# Altium footprint library Switch$.PcbLib: 117 footprints (part 8 of 8)
Each footprint in its own frame and in the unit in brackets; x right, y up, seen from the top. Pads: shape width x height; smd on the part's side, far side on the other; paste and mask are expansions set on the pad; w line width, h text height; cw(c..) or ccw(c..) is an arc to the next point about the centre after c.
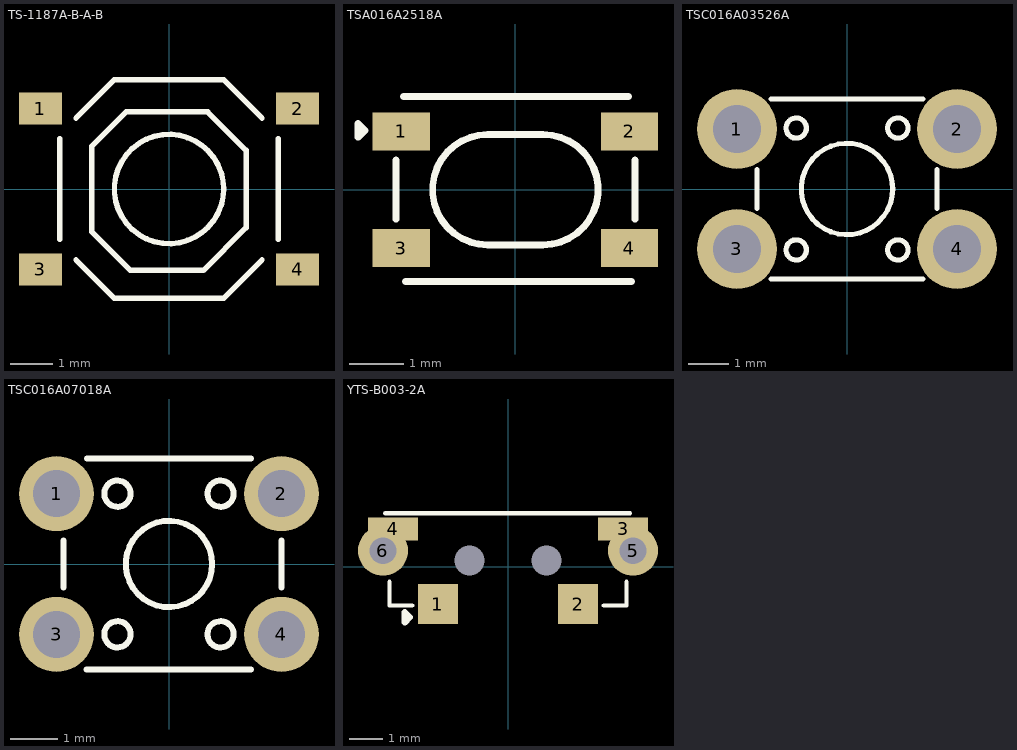
[diagram p7: the footprints below, top view; thin cyan lines are the x and y axes]

## TS-1187A-B-A-B [mm]
pads (4):
  rect 1x0.75 smd: 1(-3,1.875) 2(3,1.875) 3(-3,-1.875) 4(3,-1.875)
Top Overlay:
  circle w0.127: c0,0 r1.275
  lines w0.127: -2.55,-1.168 -2.55,1.168 ; -2.17,-1.655 -1.275,-2.55 1.275,-2.55 2.17,-1.655 ; -2.17,1.655 -1.275,2.55 1.275,2.55 2.17,1.655 ; 2.55,-1.168 2.55,1.168 ; -1.801,-0.998 -0.899,-1.9 0.8,-1.9 1.801,-0.899 1.801,0.899 0.899,1.801 -1.001,1.801 -1.801,1.001 -1.801,-0.998
3D body "C318884.step": height 1.55, standoff 0, extent -3.25,-2.601 3.25,2.601

## TSA016A2518A [mm]
pads (4):
  rect 1.05x0.7 smd paste+0 mask+0.051: 1(-2.1,1.075) 2(2.1,1.075) 3(-2.1,-1.075) 4(2.1,-1.075)
Top Overlay:
  lines w0.127: -2.2,-0.544 -2.2,0.544 ; -2.06,1.712 -1.366,1.712 1.366,1.712 2.08,1.712 ; -2.02,-1.686 -1.395,-1.686 1.367,-1.686 2.14,-1.686 ; 2.2,-0.544 2.2,0.544 ; -2.896,0.965 -2.896,1.219 -2.769,1.092 -2.896,0.965 ; -0.508,-1.016 cw(c-0.508,0) -0.508,1.016 0.508,1.016 cw(c0.508,0) 0.508,-1.016 -0.508,-1.016
3D body "C2888427.step": height 2.5, standoff 0, extent -2.25,-1.7 2.25,1.701

## TSC016A03526A [mm]
pads (4):
  round 2 hole 1.2 paste-2539.97 mask+0.051: 1(-2.75,1.5) 2(2.75,1.5) 3(-2.75,-1.5) 4(2.75,-1.5)
Top Overlay:
  circle w0.127: c0,0 r1.143
  circle w0.127: c1.27,-1.524 r0.254
  circle w0.127: c-1.27,-1.524 r0.254
  circle w0.127: c1.27,1.524 r0.254
  circle w0.127: c-1.27,1.524 r0.254
  lines w0.127: -2.25,-0.487 -2.25,0.487 ; -1.904,-2.25 1.904,-2.25 ; -1.904,2.25 1.904,2.25 ; 2.25,-0.487 2.25,0.487
3D body "TSC016A03526A.step": height 3.8, standoff -3, extent -3.25,-2.25 3.25,2.25

## TSC016A07018A [mm]
pads (4):
  round 1.6 hole 1 paste-2539.97 mask+0.051: 1(-2.4,1.5) 2(2.4,1.5) 3(-2.4,-1.5) 4(2.4,-1.5)
Top Overlay:
  circle w0.127: c0,0 r0.922
  circle w0.127: c1.1,1.5 r0.28
  circle w0.127: c-1.1,1.5 r0.28
  circle w0.127: c-1.1,-1.5 r0.28
  circle w0.127: c1.1,-1.5 r0.28
  lines w0.127: -2.25,-0.5 -2.25,0.5 ; -1.757,-2.25 1.75,-2.25 ; -1.75,2.25 1.75,2.25 ; 2.4,-0.5 2.4,0.5
3D body "C2888497.step": height 3.9, standoff -3.5, extent -3.199,-2.25 3.199,2.25

## YTS-B003-2A [mm]
pads (8):
  rect 1.2x1.2 smd: 1(-2.1,-1.125) 2(2.1,-1.125)
  rect 1.5x0.7 smd: 3(3.45,1.125) 4(-3.45,1.125)
  round 1.5 hole 0.8: 5(3.75,0.475) 6(-3.75,0.475)
  round 0 hole 0.9 unplated: MH0(-1.15,0.175) MH1(1.15,0.175)
Top Overlay:
  lines w0.127: -3.683,1.6 3.658,1.6 ; -3.556,-0.457 -3.556,-1.168 -2.87,-1.168 ; 2.87,-1.168 3.556,-1.168 3.556,-0.457
  lines w0.2: -3.099,-1.676 -2.946,-1.524 -3.099,-1.372 -3.099,-1.676
3D body "Switch.STEP": height 3.59, standoff -0.91, extent -3.7,-1.372 3.7,2.363